# Altium schematic symbol library LM1117MPX-33NOPB.SchLib: 1 symbol
Pins are listed as number, name and electrical type; pins without a type are passive.

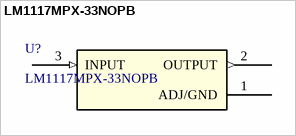
[diagram p0: symbol LM1117MPX-33NOPB]

## LM1117MPX-33NOPB
designator U?
Description; Manufacturer_Name: onsemi; Copyright: Copyright (C) 2025 Ultra Librarian. All rights reserved.; Manufacturer_Part_Number: LM1117MPX-33NOPB; RefDes: RefDes; Type: Type
footprint SOT223-318H_OSI
pins: 1 ADJ/GND, 2 OUTPUT (out), 3 INPUT (in)